# Altium schematic symbol library WR-TBL_Pluggable Connector.SchLib: 879 symbols (part 2 of 15)
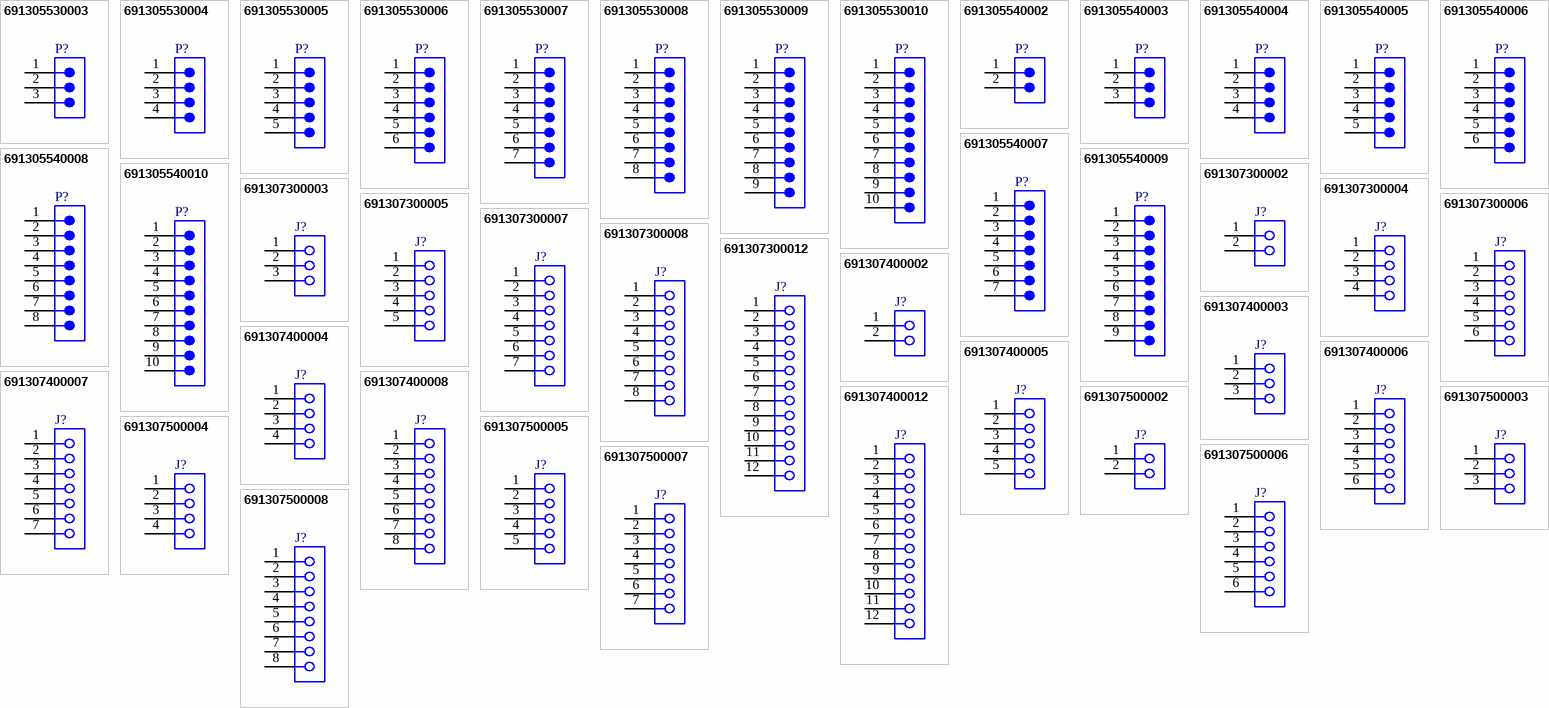
[diagram p22: symbols 691305530003 to 691307500008]

## 691307300012
designator J?  (value not drawn)
WR-TBL Series 3073 Vertical Reversed PCB Header, THT, pitch 3.81mm, 12p; Manufacturer: Wurth Elektronik; Modularity: No; Rated Current: 8A; Working Voltage: 300V (AC); Manufacturer Part Number: 691307300012; Product Series: WR-TBL; ComponentLink1Description: Website Link; ComponentLink1URL: https://www.we-online.com; ComponentLink2Description: Datasheet Link; ComponentLink2URL: https://www.we-online.com/components/products/datasheet/691307300012; Mount: Through Hole; Operating Temperature Min: -40degC; Operating Temperature Max: 115degC; Packaging: Box; Application: Pluggable; Number of Pins: 12; Number of Rows: 1; Orientation: Vertical; Lead Pitch: 3.81mm
footprint 691307300012
pins: 1, 2, 3, 4, 5, 6, 7, 8, 9, 10, 11, 12

## 691307400002
designator J?  (value not drawn)
WR-TBL Series 3074 Reversed Gender Vertical PCB Header, THT, pitch 7.62mm, 02p; Manufacturer: Wurth Elektronik; Modularity: No; Rated Current: 20A; Working Voltage: 300V (AC); Manufacturer Part Number: 691307400002; Product Series: WR-TBL; ComponentLink1Description: Website Link; ComponentLink1URL: https://www.we-online.com; ComponentLink2Description: Datasheet Link; ComponentLink2URL: https://www.we-online.com/components/products/datasheet/691307400002; Mount: Through Hole; Operating Temperature Min: -40degC; Operating Temperature Max: 105degC; Packaging: Box; Application: Pluggable; Number of Pins: 2; Number of Rows: 1; Orientation: Vertical; Lead Pitch: 7.62mm
footprint 691307400002
pins: 1, 2

## 691307400003
designator J?  (value not drawn)
WR-TBL Series 3074 Reversed Gender Vertical PCB Header, THT, pitch 7.62mm, 03p; Manufacturer: Wurth Elektronik; Modularity: No; Rated Current: 20A; Working Voltage: 300V (AC); Manufacturer Part Number: 691307400003; Product Series: WR-TBL; ComponentLink1Description: Website Link; ComponentLink1URL: https://www.we-online.com; ComponentLink2Description: Datasheet Link; ComponentLink2URL: https://www.we-online.com/components/products/datasheet/691307400003; Mount: Through Hole; Operating Temperature Min: -40degC; Operating Temperature Max: 105degC; Packaging: Box; Application: Pluggable; Number of Pins: 3; Number of Rows: 1; Orientation: Vertical; Lead Pitch: 7.62mm
footprint 691307400003
pins: 1, 2, 3

## 691307400004
designator J?  (value not drawn)
WR-TBL Series 3074 Reversed Gender Vertical PCB Header, THT, pitch 7.62mm, 04p; Manufacturer: Wurth Elektronik; Modularity: No; Rated Current: 20A; Working Voltage: 300V (AC); Manufacturer Part Number: 691307400004; Product Series: WR-TBL; ComponentLink1Description: Website Link; ComponentLink1URL: https://www.we-online.com; ComponentLink2Description: Datasheet Link; ComponentLink2URL: https://www.we-online.com/components/products/datasheet/691307400004; Mount: Through Hole; Operating Temperature Min: -40degC; Operating Temperature Max: 105degC; Packaging: Box; Application: Pluggable; Number of Pins: 4; Number of Rows: 1; Orientation: Vertical; Lead Pitch: 7.62mm
footprint 691307400004
pins: 1, 2, 3, 4

## 691307400005
designator J?  (value not drawn)
WR-TBL Series 3074 Reversed Gender Vertical PCB Header, THT, pitch 7.62mm, 05p; Manufacturer: Wurth Elektronik; Modularity: No; Rated Current: 20A; Working Voltage: 300V (AC); Manufacturer Part Number: 691307400005; Product Series: WR-TBL; ComponentLink1Description: Website Link; ComponentLink1URL: https://www.we-online.com; ComponentLink2Description: Datasheet Link; ComponentLink2URL: https://www.we-online.com/components/products/datasheet/691307400005; Mount: Through Hole; Operating Temperature Min: -40degC; Operating Temperature Max: 105degC; Packaging: Box; Application: Pluggable; Number of Pins: 5; Number of Rows: 1; Orientation: Vertical; Lead Pitch: 7.62mm
footprint 691307400005
pins: 1, 2, 3, 4, 5

## 691307400006
designator J?  (value not drawn)
WR-TBL Series 3074 Reversed Gender Vertical PCB Header, THT, pitch 7.62mm, 06p; Manufacturer: Wurth Elektronik; Modularity: No; Rated Current: 20A; Working Voltage: 300V (AC); Manufacturer Part Number: 691307400006; Product Series: WR-TBL; ComponentLink1Description: Website Link; ComponentLink1URL: https://www.we-online.com; ComponentLink2Description: Datasheet Link; ComponentLink2URL: https://www.we-online.com/components/products/datasheet/691307400006; Mount: Through Hole; Operating Temperature Min: -40degC; Operating Temperature Max: 105degC; Packaging: Box; Application: Pluggable; Number of Pins: 6; Number of Rows: 1; Orientation: Vertical; Lead Pitch: 7.62mm
footprint 691307400006
pins: 1, 2, 3, 4, 5, 6

## 691307400007
designator J?  (value not drawn)
WR-TBL Series 3074 Reversed Gender Vertical PCB Header, THT, pitch 7.62mm, 07p; Manufacturer: Wurth Elektronik; Modularity: No; Rated Current: 20A; Working Voltage: 300V (AC); Manufacturer Part Number: 691307400007; Product Series: WR-TBL; ComponentLink1Description: Website Link; ComponentLink1URL: https://www.we-online.com; ComponentLink2Description: Datasheet Link; ComponentLink2URL: https://www.we-online.com/components/products/datasheet/691307400007; Mount: Through Hole; Operating Temperature Min: -40degC; Operating Temperature Max: 105degC; Packaging: Box; Application: Pluggable; Number of Pins: 7; Number of Rows: 1; Orientation: Vertical; Lead Pitch: 7.62mm
footprint 691307400007
pins: 1, 2, 3, 4, 5, 6, 7

## 691307400008
designator J?  (value not drawn)
WR-TBL Series 3074 Reversed Gender Vertical PCB Header, THT, pitch 7.62mm, 08p; Manufacturer: Wurth Elektronik; Modularity: No; Rated Current: 20A; Working Voltage: 300V (AC); Manufacturer Part Number: 691307400008; Product Series: WR-TBL; ComponentLink1Description: Website Link; ComponentLink1URL: https://www.we-online.com; ComponentLink2Description: Datasheet Link; ComponentLink2URL: https://www.we-online.com/components/products/datasheet/691307400008; Mount: Through Hole; Operating Temperature Min: -40degC; Operating Temperature Max: 105degC; Packaging: Box; Application: Pluggable; Number of Pins: 8; Number of Rows: 1; Orientation: Vertical; Lead Pitch: 7.62mm
footprint 691307400008
pins: 1, 2, 3, 4, 5, 6, 7, 8

## 691307400012
designator J?  (value not drawn)
WR-TBL Series 3074 Reversed Gender Vertical PCB Header, THT, pitch 7.62mm, 12p; Manufacturer: Wurth Elektronik; Modularity: No; Rated Current: 20A; Working Voltage: 300V (AC); Manufacturer Part Number: 691307400012; Product Series: WR-TBL; ComponentLink1Description: Website Link; ComponentLink1URL: https://www.we-online.com; ComponentLink2Description: Datasheet Link; ComponentLink2URL: https://www.we-online.com/components/products/datasheet/691307400012; Mount: Through Hole; Operating Temperature Min: -40degC; Operating Temperature Max: 105degC; Packaging: Box; Application: Pluggable; Number of Pins: 12; Number of Rows: 1; Orientation: Vertical; Lead Pitch: 7.62mm
footprint 691307400012
pins: 1, 2, 3, 4, 5, 6, 7, 8, 9, 10, 11, 12

## 691307500002
designator J?  (value not drawn)
WR-TBL Series 3075 Reversed Gender Vertical PCB Header, THT, pitch 5.08mm, 02p; Manufacturer: Wurth Elektronik; Modularity: No; Rated Current: 20A; Working Voltage: 300V (AC); Manufacturer Part Number: 691307500002; Product Series: WR-TBL; ComponentLink1Description: Website Link; ComponentLink1URL: https://www.we-online.com; ComponentLink2Description: Datasheet Link; ComponentLink2URL: https://www.we-online.com/components/products/datasheet/691307500002; Mount: Through Hole; Operating Temperature Min: -40degC; Operating Temperature Max: 105degC; Packaging: Box; Application: Pluggable; Number of Pins: 2; Number of Rows: 1; Orientation: Vertical; Lead Pitch: 5.08mm
footprint 691307500002
pins: 1, 2

## 691307500003
designator J?  (value not drawn)
WR-TBL Series 3075 Reversed Gender Vertical PCB Header, THT, pitch 5.08mm, 03p; Manufacturer: Wurth Elektronik; Modularity: No; Rated Current: 20A; Working Voltage: 300V (AC); Manufacturer Part Number: 691307500003; Product Series: WR-TBL; ComponentLink1Description: Website Link; ComponentLink1URL: https://www.we-online.com; ComponentLink2Description: Datasheet Link; ComponentLink2URL: https://www.we-online.com/components/products/datasheet/691307500003; Mount: Through Hole; Operating Temperature Min: -40degC; Operating Temperature Max: 105degC; Packaging: Box; Application: Pluggable; Number of Pins: 3; Number of Rows: 1; Orientation: Vertical; Lead Pitch: 5.08mm
footprint 691307500003
pins: 1, 2, 3

## 691307500004
designator J?  (value not drawn)
WR-TBL Series 3075 Reversed Gender Vertical PCB Header, THT, pitch 5.08mm, 04p; Manufacturer: Wurth Elektronik; Modularity: No; Rated Current: 20A; Working Voltage: 300V (AC); Manufacturer Part Number: 691307500004; Product Series: WR-TBL; ComponentLink1Description: Website Link; ComponentLink1URL: https://www.we-online.com; ComponentLink2Description: Datasheet Link; ComponentLink2URL: https://www.we-online.com/components/products/datasheet/691307500004; Mount: Through Hole; Operating Temperature Min: -40degC; Operating Temperature Max: 105degC; Packaging: Box; Application: Pluggable; Number of Pins: 4; Number of Rows: 1; Orientation: Vertical; Lead Pitch: 5.08mm
footprint 691307500004
pins: 1, 2, 3, 4

## 691307500005
designator J?  (value not drawn)
WR-TBL Series 3075 Reversed Gender Vertical PCB Header, THT, pitch 5.08mm, 05p; Manufacturer: Wurth Elektronik; Modularity: No; Rated Current: 20A; Working Voltage: 300V (AC); Manufacturer Part Number: 691307500005; Product Series: WR-TBL; ComponentLink1Description: Website Link; ComponentLink1URL: https://www.we-online.com; ComponentLink2Description: Datasheet Link; ComponentLink2URL: https://www.we-online.com/components/products/datasheet/691307500005; Mount: Through Hole; Operating Temperature Min: -40degC; Operating Temperature Max: 105degC; Packaging: Box; Application: Pluggable; Number of Pins: 5; Number of Rows: 1; Orientation: Vertical; Lead Pitch: 5.08mm
footprint 691307500005
pins: 1, 2, 3, 4, 5

## 691307500006
designator J?  (value not drawn)
WR-TBL Series 3075 Reversed Gender Vertical PCB Header, THT, pitch 5.08mm, 06p; Manufacturer: Wurth Elektronik; Modularity: No; Rated Current: 20A; Working Voltage: 300V (AC); Manufacturer Part Number: 691307500006; Product Series: WR-TBL; ComponentLink1Description: Website Link; ComponentLink1URL: https://www.we-online.com; ComponentLink2Description: Datasheet Link; ComponentLink2URL: https://www.we-online.com/components/products/datasheet/691307500006; Mount: Through Hole; Operating Temperature Min: -40degC; Operating Temperature Max: 105degC; Packaging: Box; Application: Pluggable; Number of Pins: 6; Number of Rows: 1; Orientation: Vertical; Lead Pitch: 5.08mm
footprint 691307500006
pins: 1, 2, 3, 4, 5, 6

## 691307500007
designator J?  (value not drawn)
WR-TBL Series 3075 Reversed Gender Vertical PCB Header, THT, pitch 5.08mm, 07p; Manufacturer: Wurth Elektronik; Modularity: No; Rated Current: 20A; Working Voltage: 300V (AC); Manufacturer Part Number: 691307500007; Product Series: WR-TBL; ComponentLink1Description: Website Link; ComponentLink1URL: https://www.we-online.com; ComponentLink2Description: Datasheet Link; ComponentLink2URL: https://www.we-online.com/components/products/datasheet/691307500007; Mount: Through Hole; Operating Temperature Min: -40degC; Operating Temperature Max: 105degC; Packaging: Box; Application: Pluggable; Number of Pins: 7; Number of Rows: 1; Orientation: Vertical; Lead Pitch: 5.08mm
footprint 691307500007
pins: 1, 2, 3, 4, 5, 6, 7

## 691307500008
designator J?  (value not drawn)
WR-TBL Series 3075 Reversed Gender Vertical PCB Header, THT, pitch 5.08mm, 08p; Manufacturer: Wurth Elektronik; Modularity: No; Rated Current: 20A; Working Voltage: 300V (AC); Manufacturer Part Number: 691307500008; Product Series: WR-TBL; ComponentLink1Description: Website Link; ComponentLink1URL: https://www.we-online.com; ComponentLink2Description: Datasheet Link; ComponentLink2URL: https://www.we-online.com/components/products/datasheet/691307500008; Mount: Through Hole; Operating Temperature Min: -40degC; Operating Temperature Max: 105degC; Packaging: Box; Application: Pluggable; Number of Pins: 8; Number of Rows: 1; Orientation: Vertical; Lead Pitch: 5.08mm
footprint 691307500008
pins: 1, 2, 3, 4, 5, 6, 7, 8

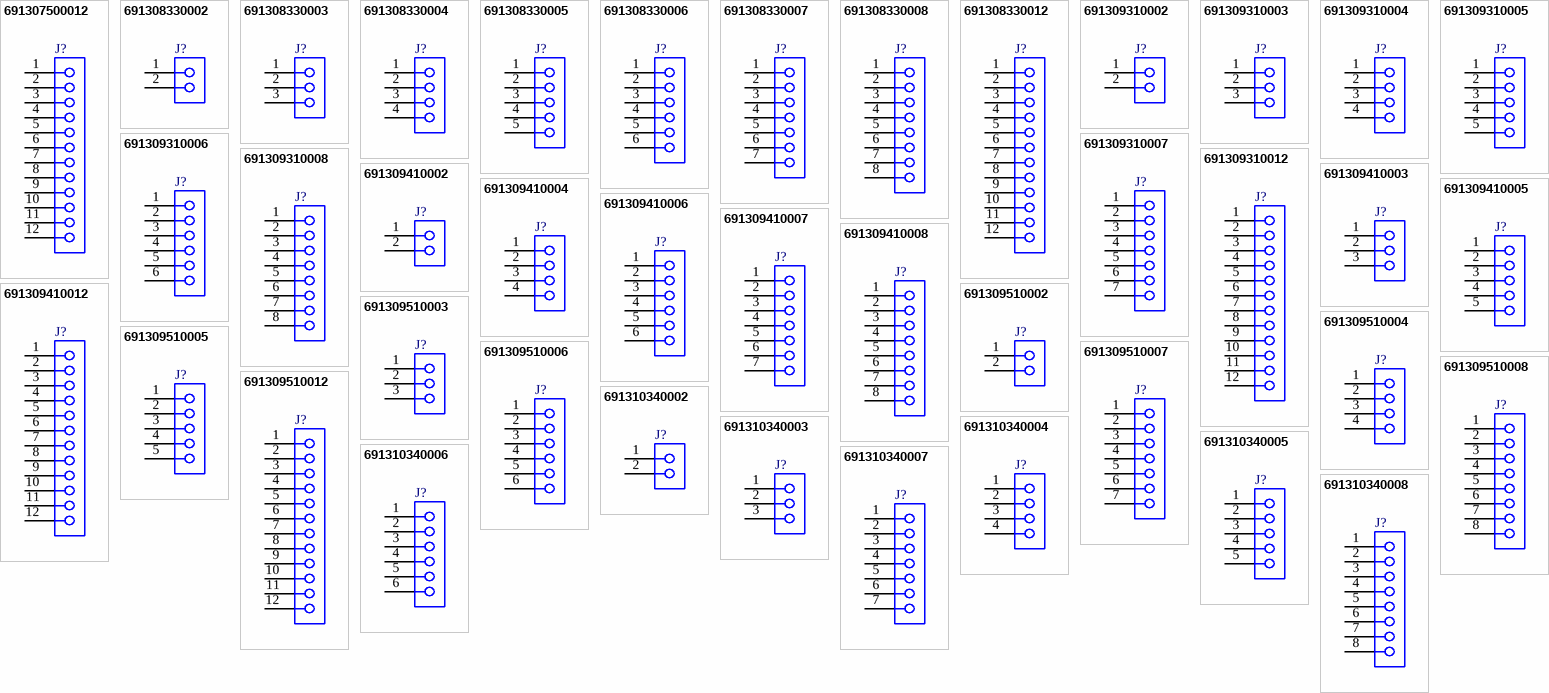
[diagram p2: symbols 691307500012 to 691310340008]

## 691307500012
designator J?  (value not drawn)
WR-TBL Series 3075 Reversed Gender Vertical PCB Header, THT, pitch 5.08mm, 12p; Manufacturer: Wurth Elektronik; Modularity: No; Rated Current: 20A; Working Voltage: 300V (AC); Manufacturer Part Number: 691307500012; Product Series: WR-TBL; ComponentLink1Description: Website Link; ComponentLink1URL: https://www.we-online.com; ComponentLink2Description: Datasheet Link; ComponentLink2URL: https://www.we-online.com/components/products/datasheet/691307500012; Mount: Through Hole; Operating Temperature Min: -40degC; Operating Temperature Max: 105degC; Packaging: Box; Application: Pluggable; Number of Pins: 12; Number of Rows: 1; Orientation: Vertical; Lead Pitch: 5.08mm
footprint 691307500012
pins: 1, 2, 3, 4, 5, 6, 7, 8, 9, 10, 11, 12

## 691308330002
designator J?  (value not drawn)
WR-TBL Series 3083 Vertical Reserved PCB Header with Flanges, THT, pitch 3.81mm, 02p; Manufacturer: Wurth Elektronik; Modularity: No; Rated Current: 8A; Working Voltage: 300V (AC); Manufacturer Part Number: 691308330002; Product Series: WR-TBL; ComponentLink1Description: Website Link; ComponentLink1URL: https://www.we-online.com; ComponentLink2Description: Datasheet Link; ComponentLink2URL: https://www.we-online.com/components/products/datasheet/691308330002; Mount: Through Hole; Operating Temperature Min: -40degC; Operating Temperature Max: 115degC; Packaging: Box; Application: Pluggable; Number of Pins: 2; Number of Rows: 1; Orientation: Vertical; Lead Pitch: 3.81mm
footprint 691308330002
pins: 1, 2

## 691308330003
designator J?  (value not drawn)
WR-TBL Series 3083 Vertical Reserved PCB Header with Flanges, THT, pitch 3.81mm, 03p; Manufacturer: Wurth Elektronik; Modularity: No; Rated Current: 8A; Working Voltage: 300V (AC); Manufacturer Part Number: 691308330003; Product Series: WR-TBL; ComponentLink1Description: Website Link; ComponentLink1URL: https://www.we-online.com; ComponentLink2Description: Datasheet Link; ComponentLink2URL: https://www.we-online.com/components/products/datasheet/691308330003; Mount: Through Hole; Operating Temperature Min: -40degC; Operating Temperature Max: 115degC; Packaging: Box; Application: Pluggable; Number of Pins: 3; Number of Rows: 1; Orientation: Vertical; Lead Pitch: 3.81mm
footprint 691308330003
pins: 1, 2, 3

## 691308330004
designator J?  (value not drawn)
WR-TBL Series 3083 Vertical Reserved PCB Header with Flanges, THT, pitch 3.81mm, 04p; Manufacturer: Wurth Elektronik; Modularity: No; Rated Current: 8A; Working Voltage: 300V (AC); Manufacturer Part Number: 691308330004; Product Series: WR-TBL; ComponentLink1Description: Website Link; ComponentLink1URL: https://www.we-online.com; ComponentLink2Description: Datasheet Link; ComponentLink2URL: https://www.we-online.com/components/products/datasheet/691308330004; Mount: Through Hole; Operating Temperature Min: -40degC; Operating Temperature Max: 115degC; Packaging: Box; Application: Pluggable; Number of Pins: 4; Number of Rows: 1; Orientation: Vertical; Lead Pitch: 3.81mm
footprint 691308330004
pins: 1, 2, 3, 4

## 691308330005
designator J?  (value not drawn)
WR-TBL Series 3083 Vertical Reserved PCB Header with Flanges, THT, pitch 3.81mm, 05p; Manufacturer: Wurth Elektronik; Modularity: No; Rated Current: 8A; Working Voltage: 300V (AC); Manufacturer Part Number: 691308330005; Product Series: WR-TBL; ComponentLink1Description: Website Link; ComponentLink1URL: https://www.we-online.com; ComponentLink2Description: Datasheet Link; ComponentLink2URL: https://www.we-online.com/components/products/datasheet/691308330005; Mount: Through Hole; Operating Temperature Min: -40degC; Operating Temperature Max: 115degC; Packaging: Box; Application: Pluggable; Number of Pins: 5; Number of Rows: 1; Orientation: Vertical; Lead Pitch: 3.81mm
footprint 691308330005
pins: 1, 2, 3, 4, 5

## 691308330006
designator J?  (value not drawn)
WR-TBL Series 3083 Vertical Reserved PCB Header with Flanges, THT, pitch 3.81mm, 06p; Manufacturer: Wurth Elektronik; Modularity: No; Rated Current: 8A; Working Voltage: 300V (AC); Manufacturer Part Number: 691308330006; Product Series: WR-TBL; ComponentLink1Description: Website Link; ComponentLink1URL: https://www.we-online.com; ComponentLink2Description: Datasheet Link; ComponentLink2URL: https://www.we-online.com/components/products/datasheet/691308330006; Mount: Through Hole; Operating Temperature Min: -40degC; Operating Temperature Max: 115degC; Packaging: Box; Application: Pluggable; Number of Pins: 6; Number of Rows: 1; Orientation: Vertical; Lead Pitch: 3.81mm
footprint 691308330006
pins: 1, 2, 3, 4, 5, 6

## 691308330007
designator J?  (value not drawn)
WR-TBL Series 3083 Vertical Reserved PCB Header with Flanges, THT, pitch 3.81mm, 07p; Manufacturer: Wurth Elektronik; Modularity: No; Rated Current: 8A; Working Voltage: 300V (AC); Manufacturer Part Number: 691308330007; Product Series: WR-TBL; ComponentLink1Description: Website Link; ComponentLink1URL: https://www.we-online.com; ComponentLink2Description: Datasheet Link; ComponentLink2URL: https://www.we-online.com/components/products/datasheet/691308330007; Mount: Through Hole; Operating Temperature Min: -40degC; Operating Temperature Max: 115degC; Packaging: Box; Application: Pluggable; Number of Pins: 7; Number of Rows: 1; Orientation: Vertical; Lead Pitch: 3.81mm
footprint 691308330007
pins: 1, 2, 3, 4, 5, 6, 7

## 691308330008
designator J?  (value not drawn)
WR-TBL Series 3083 Vertical Reserved PCB Header with Flanges, THT, pitch 3.81mm, 08p; Manufacturer: Wurth Elektronik; Modularity: No; Rated Current: 8A; Working Voltage: 300V (AC); Manufacturer Part Number: 691308330008; Product Series: WR-TBL; ComponentLink1Description: Website Link; ComponentLink1URL: https://www.we-online.com; ComponentLink2Description: Datasheet Link; ComponentLink2URL: https://www.we-online.com/components/products/datasheet/691308330008; Mount: Through Hole; Operating Temperature Min: -40degC; Operating Temperature Max: 115degC; Packaging: Box; Application: Pluggable; Number of Pins: 8; Number of Rows: 1; Orientation: Vertical; Lead Pitch: 3.81mm
footprint 691308330008
pins: 1, 2, 3, 4, 5, 6, 7, 8

## 691308330012
designator J?  (value not drawn)
WR-TBL Series 3083 Vertical Reserved PCB Header with Flanges, THT, pitch 3.81mm, 12p; Manufacturer: Wurth Elektronik; Modularity: No; Rated Current: 8A; Working Voltage: 300V (AC); Manufacturer Part Number: 691308330012; Product Series: WR-TBL; ComponentLink1Description: Website Link; ComponentLink1URL: https://www.we-online.com; ComponentLink2Description: Datasheet Link; ComponentLink2URL: https://www.we-online.com/components/products/datasheet/691308330012; Mount: Through Hole; Operating Temperature Min: -40degC; Operating Temperature Max: 115degC; Packaging: Box; Application: Pluggable; Number of Pins: 12; Number of Rows: 1; Orientation: Vertical; Lead Pitch: 3.81mm
footprint 691308330012
pins: 1, 2, 3, 4, 5, 6, 7, 8, 9, 10, 11, 12

## 691309310002
designator J?  (value not drawn)
WR-TBL Series 3093 Horizontal Reserved PCB Header with Flanges, THT, pitch 3.81mm, 02p; Manufacturer: Wurth Elektronik; Modularity: No; Rated Current: 8A; Working Voltage: 300V (AC); Manufacturer Part Number: 691309310002; Product Series: WR-TBL; ComponentLink1Description: Website Link; ComponentLink1URL: https://www.we-online.com; ComponentLink2Description: Datasheet Link; ComponentLink2URL: https://www.we-online.com/components/products/datasheet/691309310002; Mount: Through Hole; Operating Temperature Min: -40degC; Operating Temperature Max: 115degC; Packaging: Box; Application: Pluggable; Number of Pins: 2; Number of Rows: 1; Orientation: Horizontal; Lead Pitch: 3.81mm
footprint 691309310002
pins: 1, 2

## 691309310003
designator J?  (value not drawn)
WR-TBL Series 3093 Horizontal Reserved PCB Header with Flanges, THT, pitch 3.81mm, 03p; Manufacturer: Wurth Elektronik; Modularity: No; Rated Current: 8A; Working Voltage: 300V (AC); Manufacturer Part Number: 691309310003; Product Series: WR-TBL; ComponentLink1Description: Website Link; ComponentLink1URL: https://www.we-online.com; ComponentLink2Description: Datasheet Link; ComponentLink2URL: https://www.we-online.com/components/products/datasheet/691309310003; Mount: Through Hole; Operating Temperature Min: -40degC; Operating Temperature Max: 115degC; Packaging: Box; Application: Pluggable; Number of Pins: 3; Number of Rows: 1; Orientation: Horizontal; Lead Pitch: 3.81mm
footprint 691309310003
pins: 1, 2, 3

## 691309310004
designator J?  (value not drawn)
WR-TBL Series 3093 Horizontal Reserved PCB Header with Flanges, THT, pitch 3.81mm, 04p; Manufacturer: Wurth Elektronik; Modularity: No; Rated Current: 8A; Working Voltage: 300V (AC); Manufacturer Part Number: 691309310004; Product Series: WR-TBL; ComponentLink1Description: Website Link; ComponentLink1URL: https://www.we-online.com; ComponentLink2Description: Datasheet Link; ComponentLink2URL: https://www.we-online.com/components/products/datasheet/691309310004; Mount: Through Hole; Operating Temperature Min: -40degC; Operating Temperature Max: 115degC; Packaging: Box; Application: Pluggable; Number of Pins: 4; Number of Rows: 1; Orientation: Horizontal; Lead Pitch: 3.81mm
footprint 691309310004
pins: 1, 2, 3, 4

## 691309310005
designator J?  (value not drawn)
WR-TBL Series 3093 Horizontal Reserved PCB Header with Flanges, THT, pitch 3.81mm, 05p; Manufacturer: Wurth Elektronik; Modularity: No; Rated Current: 8A; Working Voltage: 300V (AC); Manufacturer Part Number: 691309310005; Product Series: WR-TBL; ComponentLink1Description: Website Link; ComponentLink1URL: https://www.we-online.com; ComponentLink2Description: Datasheet Link; ComponentLink2URL: https://www.we-online.com/components/products/datasheet/691309310005; Mount: Through Hole; Operating Temperature Min: -40degC; Operating Temperature Max: 115degC; Packaging: Box; Application: Pluggable; Number of Pins: 5; Number of Rows: 1; Orientation: Horizontal; Lead Pitch: 3.81mm
footprint 691309310005
pins: 1, 2, 3, 4, 5

## 691309310006
designator J?  (value not drawn)
WR-TBL Series 3093 Horizontal Reserved PCB Header with Flanges, THT, pitch 3.81mm, 06p; Manufacturer: Wurth Elektronik; Modularity: No; Rated Current: 8A; Working Voltage: 300V (AC); Manufacturer Part Number: 691309310006; Product Series: WR-TBL; ComponentLink1Description: Website Link; ComponentLink1URL: https://www.we-online.com; ComponentLink2Description: Datasheet Link; ComponentLink2URL: https://www.we-online.com/components/products/datasheet/691309310006; Mount: Through Hole; Operating Temperature Min: -40degC; Operating Temperature Max: 115degC; Packaging: Box; Application: Pluggable; Number of Pins: 6; Number of Rows: 1; Orientation: Horizontal; Lead Pitch: 3.81mm
footprint 691309310006
pins: 1, 2, 3, 4, 5, 6

## 691309310007
designator J?  (value not drawn)
WR-TBL Series 3093 Horizontal Reserved PCB Header with Flanges, THT, pitch 3.81mm, 07p; Manufacturer: Wurth Elektronik; Modularity: No; Rated Current: 8A; Working Voltage: 300V (AC); Manufacturer Part Number: 691309310007; Product Series: WR-TBL; ComponentLink1Description: Website Link; ComponentLink1URL: https://www.we-online.com; ComponentLink2Description: Datasheet Link; ComponentLink2URL: https://www.we-online.com/components/products/datasheet/691309310007; Mount: Through Hole; Operating Temperature Min: -40degC; Operating Temperature Max: 115degC; Packaging: Box; Application: Pluggable; Number of Pins: 7; Number of Rows: 1; Orientation: Horizontal; Lead Pitch: 3.81mm
footprint 691309310007
pins: 1, 2, 3, 4, 5, 6, 7

## 691309310008
designator J?  (value not drawn)
WR-TBL Series 3093 Horizontal Reserved PCB Header with Flanges, THT, pitch 3.81mm, 08p; Manufacturer: Wurth Elektronik; Modularity: No; Rated Current: 8A; Working Voltage: 300V (AC); Manufacturer Part Number: 691309310008; Product Series: WR-TBL; ComponentLink1Description: Website Link; ComponentLink1URL: https://www.we-online.com; ComponentLink2Description: Datasheet Link; ComponentLink2URL: https://www.we-online.com/components/products/datasheet/691309310008; Mount: Through Hole; Operating Temperature Min: -40degC; Operating Temperature Max: 115degC; Packaging: Box; Application: Pluggable; Number of Pins: 8; Number of Rows: 1; Orientation: Horizontal; Lead Pitch: 3.81mm
footprint 691309310008
pins: 1, 2, 3, 4, 5, 6, 7, 8

## 691309310012
designator J?  (value not drawn)
WR-TBL Series 3093 Horizontal Reserved PCB Header with Flanges, THT, pitch 3.81mm, 12p; Manufacturer: Wurth Elektronik; Modularity: No; Rated Current: 8A; Working Voltage: 300V (AC); Manufacturer Part Number: 691309310012; Product Series: WR-TBL; ComponentLink1Description: Website Link; ComponentLink1URL: https://www.we-online.com; ComponentLink2Description: Datasheet Link; ComponentLink2URL: https://www.we-online.com/components/products/datasheet/691309310012; Mount: Through Hole; Operating Temperature Min: -40degC; Operating Temperature Max: 115degC; Packaging: Box; Application: Pluggable; Number of Pins: 12; Number of Rows: 1; Orientation: Horizontal; Lead Pitch: 3.81mm
footprint 691309310012
pins: 1, 2, 3, 4, 5, 6, 7, 8, 9, 10, 11, 12

## 691309410002
designator J?  (value not drawn)
WR-TBL Series 3094 Reversed Gender Horizontal PCB Header, THT, pitch 7.62mm, 02p; Manufacturer: Wurth Elektronik; Modularity: No; Rated Current: 20A; Working Voltage: 300V (AC); Manufacturer Part Number: 691309410002; Product Series: WR-TBL; ComponentLink1Description: Website Link; ComponentLink1URL: https://www.we-online.com; ComponentLink2Description: Datasheet Link; ComponentLink2URL: https://www.we-online.com/components/products/datasheet/691309410002; Mount: Through Hole; Operating Temperature Min: -40degC; Operating Temperature Max: 105degC; Packaging: Box; Application: Pluggable; Number of Pins: 2; Number of Rows: 1; Orientation: Horizontal; Lead Pitch: 7.62mm
footprint 691309410002
pins: 1, 2

## 691309410003
designator J?  (value not drawn)
WR-TBL Series 3094 Reversed Gender Horizontal PCB Header, THT, pitch 7.62mm, 03p; Manufacturer: Wurth Elektronik; Modularity: No; Rated Current: 20A; Working Voltage: 300V (AC); Manufacturer Part Number: 691309410003; Product Series: WR-TBL; ComponentLink1Description: Website Link; ComponentLink1URL: https://www.we-online.com; ComponentLink2Description: Datasheet Link; ComponentLink2URL: https://www.we-online.com/components/products/datasheet/691309410003; Mount: Through Hole; Operating Temperature Min: -40degC; Operating Temperature Max: 105degC; Packaging: Box; Application: Pluggable; Number of Pins: 3; Number of Rows: 1; Orientation: Horizontal; Lead Pitch: 7.62mm
footprint 691309410003
pins: 1, 2, 3

## 691309410004
designator J?  (value not drawn)
WR-TBL Series 3094 Reversed Gender Horizontal PCB Header, THT, pitch 7.62mm, 04p; Manufacturer: Wurth Elektronik; Modularity: No; Rated Current: 20A; Working Voltage: 300V (AC); Manufacturer Part Number: 691309410004; Product Series: WR-TBL; ComponentLink1Description: Website Link; ComponentLink1URL: https://www.we-online.com; ComponentLink2Description: Datasheet Link; ComponentLink2URL: https://www.we-online.com/components/products/datasheet/691309410004; Mount: Through Hole; Operating Temperature Min: -40degC; Operating Temperature Max: 105degC; Packaging: Box; Application: Pluggable; Number of Pins: 4; Number of Rows: 1; Orientation: Horizontal; Lead Pitch: 7.62mm
footprint 691309410004
pins: 1, 2, 3, 4

## 691309410005
designator J?  (value not drawn)
WR-TBL Series 3094 Reversed Gender Horizontal PCB Header, THT, pitch 7.62mm, 05p; Manufacturer: Wurth Elektronik; Modularity: No; Rated Current: 20A; Working Voltage: 300V (AC); Manufacturer Part Number: 691309410005; Product Series: WR-TBL; ComponentLink1Description: Website Link; ComponentLink1URL: https://www.we-online.com; ComponentLink2Description: Datasheet Link; ComponentLink2URL: https://www.we-online.com/components/products/datasheet/691309410005; Mount: Through Hole; Operating Temperature Min: -40degC; Operating Temperature Max: 105degC; Packaging: Box; Application: Pluggable; Number of Pins: 5; Number of Rows: 1; Orientation: Horizontal; Lead Pitch: 7.62mm
footprint 691309410005
pins: 1, 2, 3, 4, 5

## 691309410006
designator J?  (value not drawn)
WR-TBL Series 3094 Reversed Gender Horizontal PCB Header, THT, pitch 7.62mm, 06p; Manufacturer: Wurth Elektronik; Modularity: No; Rated Current: 20A; Working Voltage: 300V (AC); Manufacturer Part Number: 691309410006; Product Series: WR-TBL; ComponentLink1Description: Website Link; ComponentLink1URL: https://www.we-online.com; ComponentLink2Description: Datasheet Link; ComponentLink2URL: https://www.we-online.com/components/products/datasheet/691309410006; Mount: Through Hole; Operating Temperature Min: -40degC; Operating Temperature Max: 105degC; Packaging: Box; Application: Pluggable; Number of Pins: 6; Number of Rows: 1; Orientation: Horizontal; Lead Pitch: 7.62mm
footprint 691309410006
pins: 1, 2, 3, 4, 5, 6

## 691309410007
designator J?  (value not drawn)
WR-TBL Series 3094 Reversed Gender Horizontal PCB Header, THT, pitch 7.62mm, 07p; Manufacturer: Wurth Elektronik; Modularity: No; Rated Current: 20A; Working Voltage: 300V (AC); Manufacturer Part Number: 691309410007; Product Series: WR-TBL; ComponentLink1Description: Website Link; ComponentLink1URL: https://www.we-online.com; ComponentLink2Description: Datasheet Link; ComponentLink2URL: https://www.we-online.com/components/products/datasheet/691309410007; Mount: Through Hole; Operating Temperature Min: -40degC; Operating Temperature Max: 105degC; Packaging: Box; Application: Pluggable; Number of Pins: 7; Number of Rows: 1; Orientation: Horizontal; Lead Pitch: 7.62mm
footprint 691309410007
pins: 1, 2, 3, 4, 5, 6, 7

## 691309410008
designator J?  (value not drawn)
WR-TBL Series 3094 Reversed Gender Horizontal PCB Header, THT, pitch 7.62mm, 08p; Manufacturer: Wurth Elektronik; Modularity: No; Rated Current: 20A; Working Voltage: 300V (AC); Manufacturer Part Number: 691309410008; Product Series: WR-TBL; ComponentLink1Description: Website Link; ComponentLink1URL: https://www.we-online.com; ComponentLink2Description: Datasheet Link; ComponentLink2URL: https://www.we-online.com/components/products/datasheet/691309410008; Mount: Through Hole; Operating Temperature Min: -40degC; Operating Temperature Max: 105degC; Packaging: Box; Application: Pluggable; Number of Pins: 8; Number of Rows: 1; Orientation: Horizontal; Lead Pitch: 7.62mm
footprint 691309410008
pins: 1, 2, 3, 4, 5, 6, 7, 8

## 691309410012
designator J?  (value not drawn)
WR-TBL Series 3094 Reversed Gender Horizontal PCB Header, THT, pitch 7.62mm, 12p; Manufacturer: Wurth Elektronik; Modularity: No; Rated Current: 20A; Working Voltage: 300V (AC); Manufacturer Part Number: 691309410012; Product Series: WR-TBL; ComponentLink1Description: Website Link; ComponentLink1URL: https://www.we-online.com; ComponentLink2Description: Datasheet Link; ComponentLink2URL: https://www.we-online.com/components/products/datasheet/691309410012; Mount: Through Hole; Operating Temperature Min: -40degC; Operating Temperature Max: 105degC; Packaging: Box; Application: Pluggable; Number of Pins: 12; Number of Rows: 1; Orientation: Horizontal; Lead Pitch: 7.62mm
footprint 691309410012
pins: 1, 2, 3, 4, 5, 6, 7, 8, 9, 10, 11, 12

## 691309510002
designator J?  (value not drawn)
WR-TBL Series 3095 Reversed Gender Horizontal PCB Header, THT, pitch 5.08mm, 02p; Manufacturer: Wurth Elektronik; Modularity: No; Rated Current: 20A; Working Voltage: 300V (AC); Manufacturer Part Number: 691309510002; Product Series: WR-TBL; ComponentLink1Description: Website Link; ComponentLink1URL: https://www.we-online.com; ComponentLink2Description: Datasheet Link; ComponentLink2URL: https://www.we-online.com/components/products/datasheet/691309510002; Mount: Through Hole; Operating Temperature Min: -40degC; Operating Temperature Max: 105degC; Packaging: Box; Application: Pluggable; Number of Pins: 2; Number of Rows: 1; Orientation: Horizontal; Lead Pitch: 5.08mm
footprint 691309510002
pins: 1, 2

## 691309510003
designator J?  (value not drawn)
WR-TBL Series 3095 Reversed Gender Horizontal PCB Header, THT, pitch 5.08mm, 03p; Manufacturer: Wurth Elektronik; Modularity: No; Rated Current: 20A; Working Voltage: 300V (AC); Manufacturer Part Number: 691309510003; Product Series: WR-TBL; ComponentLink1Description: Website Link; ComponentLink1URL: https://www.we-online.com; ComponentLink2Description: Datasheet Link; ComponentLink2URL: https://www.we-online.com/components/products/datasheet/691309510003; Mount: Through Hole; Operating Temperature Min: -40degC; Operating Temperature Max: 105degC; Packaging: Box; Application: Pluggable; Number of Pins: 3; Number of Rows: 1; Orientation: Horizontal; Lead Pitch: 5.08mm
footprint 691309510003
pins: 1, 2, 3

## 691309510004
designator J?  (value not drawn)
WR-TBL Series 3095 Reversed Gender Horizontal PCB Header, THT, pitch 5.08mm, 04p; Manufacturer: Wurth Elektronik; Modularity: No; Rated Current: 20A; Working Voltage: 300V (AC); Manufacturer Part Number: 691309510004; Product Series: WR-TBL; ComponentLink1Description: Website Link; ComponentLink1URL: https://www.we-online.com; ComponentLink2Description: Datasheet Link; ComponentLink2URL: https://www.we-online.com/components/products/datasheet/691309510004; Mount: Through Hole; Operating Temperature Min: -40degC; Operating Temperature Max: 105degC; Packaging: Box; Application: Pluggable; Number of Pins: 4; Number of Rows: 1; Orientation: Horizontal; Lead Pitch: 5.08mm
footprint 691309510004
pins: 1, 2, 3, 4

## 691309510005
designator J?  (value not drawn)
WR-TBL Series 3095 Reversed Gender Horizontal PCB Header, THT, pitch 5.08mm, 05p; Manufacturer: Wurth Elektronik; Modularity: No; Rated Current: 20A; Working Voltage: 300V (AC); Manufacturer Part Number: 691309510005; Product Series: WR-TBL; ComponentLink1Description: Website Link; ComponentLink1URL: https://www.we-online.com; ComponentLink2Description: Datasheet Link; ComponentLink2URL: https://www.we-online.com/components/products/datasheet/691309510005; Mount: Through Hole; Operating Temperature Min: -40degC; Operating Temperature Max: 105degC; Packaging: Box; Application: Pluggable; Number of Pins: 5; Number of Rows: 1; Orientation: Horizontal; Lead Pitch: 5.08mm
footprint 691309510005
pins: 1, 2, 3, 4, 5

## 691309510006
designator J?  (value not drawn)
WR-TBL Series 3095 Reversed Gender Horizontal PCB Header, THT, pitch 5.08mm, 06p; Manufacturer: Wurth Elektronik; Modularity: No; Rated Current: 20A; Working Voltage: 300V (AC); Manufacturer Part Number: 691309510006; Product Series: WR-TBL; ComponentLink1Description: Website Link; ComponentLink1URL: https://www.we-online.com; ComponentLink2Description: Datasheet Link; ComponentLink2URL: https://www.we-online.com/components/products/datasheet/691309510006; Mount: Through Hole; Operating Temperature Min: -40degC; Operating Temperature Max: 105degC; Packaging: Box; Application: Pluggable; Number of Pins: 6; Number of Rows: 1; Orientation: Horizontal; Lead Pitch: 5.08mm
footprint 691309510006
pins: 1, 2, 3, 4, 5, 6

## 691309510007
designator J?  (value not drawn)
WR-TBL Series 3095 Reversed Gender Horizontal PCB Header, THT, pitch 5.08mm, 07p; Manufacturer: Wurth Elektronik; Modularity: No; Rated Current: 20A; Working Voltage: 300V (AC); Manufacturer Part Number: 691309510007; Product Series: WR-TBL; ComponentLink1Description: Website Link; ComponentLink1URL: https://www.we-online.com; ComponentLink2Description: Datasheet Link; ComponentLink2URL: https://www.we-online.com/components/products/datasheet/691309510007; Mount: Through Hole; Operating Temperature Min: -40degC; Operating Temperature Max: 105degC; Packaging: Box; Application: Pluggable; Number of Pins: 7; Number of Rows: 1; Orientation: Horizontal; Lead Pitch: 5.08mm
footprint 691309510007
pins: 1, 2, 3, 4, 5, 6, 7

## 691309510008
designator J?  (value not drawn)
WR-TBL Series 3095 Reversed Gender Horizontal PCB Header, THT, pitch 5.08mm, 08p; Manufacturer: Wurth Elektronik; Modularity: No; Rated Current: 20A; Working Voltage: 300V (AC); Manufacturer Part Number: 691309510008; Product Series: WR-TBL; ComponentLink1Description: Website Link; ComponentLink1URL: https://www.we-online.com; ComponentLink2Description: Datasheet Link; ComponentLink2URL: https://www.we-online.com/components/products/datasheet/691309510008; Mount: Through Hole; Operating Temperature Min: -40degC; Operating Temperature Max: 105degC; Packaging: Box; Application: Pluggable; Number of Pins: 8; Number of Rows: 1; Orientation: Horizontal; Lead Pitch: 5.08mm
footprint 691309510008
pins: 1, 2, 3, 4, 5, 6, 7, 8

## 691309510012
designator J?  (value not drawn)
WR-TBL Series 3095 Reversed Gender Horizontal PCB Header, THT, pitch 5.08mm, 12p; Manufacturer: Wurth Elektronik; Modularity: No; Rated Current: 20A; Working Voltage: 300V (AC); Manufacturer Part Number: 691309510012; Product Series: WR-TBL; ComponentLink1Description: Website Link; ComponentLink1URL: https://www.we-online.com; ComponentLink2Description: Datasheet Link; ComponentLink2URL: https://www.we-online.com/components/products/datasheet/691309510012; Mount: Through Hole; Operating Temperature Min: -40degC; Operating Temperature Max: 105degC; Packaging: Box; Application: Pluggable; Number of Pins: 12; Number of Rows: 1; Orientation: Horizontal; Lead Pitch: 5.08mm
footprint 691309510012
pins: 1, 2, 3, 4, 5, 6, 7, 8, 9, 10, 11, 12

## 691310340002
designator J?  (value not drawn)
WR-TBL Series 3103 Horizontal PCB Header with Flanges, THT, pitch 3.81mm, 02p; Manufacturer: Wurth Elektronik; Modularity: No; Rated Current: 8A; Working Voltage: 300V (AC); Manufacturer Part Number: 691310340002; Product Series: WR-TBL; ComponentLink1Description: Website Link; ComponentLink1URL: https://www.we-online.com; ComponentLink2Description: Datasheet Link; ComponentLink2URL: https://www.we-online.com/components/products/datasheet/691310340002; Mount: Through Hole; Operating Temperature Min: -40degC; Operating Temperature Max: 115degC; Packaging: Box; Application: Pluggable; Number of Pins: 2; Number of Rows: 1; Orientation: Horizontal; Lead Pitch: 3.81mm
footprint 691310340002
pins: 1, 2

## 691310340003
designator J?  (value not drawn)
WR-TBL Series 3103 Horizontal PCB Header with Flanges, THT, pitch 3.81mm, 03p; Manufacturer: Wurth Elektronik; Modularity: No; Rated Current: 8A; Working Voltage: 300V (AC); Manufacturer Part Number: 691310340003; Product Series: WR-TBL; ComponentLink1Description: Website Link; ComponentLink1URL: https://www.we-online.com; ComponentLink2Description: Datasheet Link; ComponentLink2URL: https://www.we-online.com/components/products/datasheet/691310340003; Mount: Through Hole; Operating Temperature Min: -40degC; Operating Temperature Max: 115degC; Packaging: Box; Application: Pluggable; Number of Pins: 3; Number of Rows: 1; Orientation: Horizontal; Lead Pitch: 3.81mm
footprint 691310340003
pins: 1, 2, 3

## 691310340004
designator J?  (value not drawn)
WR-TBL Series 3103 Horizontal PCB Header with Flanges, THT, pitch 3.81mm, 04p; Manufacturer: Wurth Elektronik; Modularity: No; Rated Current: 8A; Working Voltage: 300V (AC); Manufacturer Part Number: 691310340004; Product Series: WR-TBL; ComponentLink1Description: Website Link; ComponentLink1URL: https://www.we-online.com; ComponentLink2Description: Datasheet Link; ComponentLink2URL: https://www.we-online.com/components/products/datasheet/691310340004; Mount: Through Hole; Operating Temperature Min: -40degC; Operating Temperature Max: 115degC; Packaging: Box; Application: Pluggable; Number of Pins: 4; Number of Rows: 1; Orientation: Horizontal; Lead Pitch: 3.81mm
footprint 691310340004
pins: 1, 2, 3, 4

## 691310340005
designator J?  (value not drawn)
WR-TBL Series 3103 Horizontal PCB Header with Flanges, THT, pitch 3.81mm, 05p; Manufacturer: Wurth Elektronik; Modularity: No; Rated Current: 8A; Working Voltage: 300V (AC); Manufacturer Part Number: 691310340005; Product Series: WR-TBL; ComponentLink1Description: Website Link; ComponentLink1URL: https://www.we-online.com; ComponentLink2Description: Datasheet Link; ComponentLink2URL: https://www.we-online.com/components/products/datasheet/691310340005; Mount: Through Hole; Operating Temperature Min: -40degC; Operating Temperature Max: 115degC; Packaging: Box; Application: Pluggable; Number of Pins: 5; Number of Rows: 1; Orientation: Horizontal; Lead Pitch: 3.81mm
footprint 691310340005
pins: 1, 2, 3, 4, 5

## 691310340006
designator J?  (value not drawn)
WR-TBL Series 3103 Horizontal PCB Header with Flanges, THT, pitch 3.81mm, 06p; Manufacturer: Wurth Elektronik; Modularity: No; Rated Current: 8A; Working Voltage: 300V (AC); Manufacturer Part Number: 691310340006; Product Series: WR-TBL; ComponentLink1Description: Website Link; ComponentLink1URL: https://www.we-online.com; ComponentLink2Description: Datasheet Link; ComponentLink2URL: https://www.we-online.com/components/products/datasheet/691310340006; Mount: Through Hole; Operating Temperature Min: -40degC; Operating Temperature Max: 115degC; Packaging: Box; Application: Pluggable; Number of Pins: 6; Number of Rows: 1; Orientation: Horizontal; Lead Pitch: 3.81mm
footprint 691310340006
pins: 1, 2, 3, 4, 5, 6

## 691310340007
designator J?  (value not drawn)
WR-TBL Series 3103 Horizontal PCB Header with Flanges, THT, pitch 3.81mm, 07p; Manufacturer: Wurth Elektronik; Modularity: No; Rated Current: 8A; Working Voltage: 300V (AC); Manufacturer Part Number: 691310340007; Product Series: WR-TBL; ComponentLink1Description: Website Link; ComponentLink1URL: https://www.we-online.com; ComponentLink2Description: Datasheet Link; ComponentLink2URL: https://www.we-online.com/components/products/datasheet/691310340007; Mount: Through Hole; Operating Temperature Min: -40degC; Operating Temperature Max: 115degC; Packaging: Box; Application: Pluggable; Number of Pins: 7; Number of Rows: 1; Orientation: Horizontal; Lead Pitch: 3.81mm
footprint 691310340007
pins: 1, 2, 3, 4, 5, 6, 7

## 691310340008
designator J?  (value not drawn)
WR-TBL Series 3103 Horizontal PCB Header with Flanges, THT, pitch 3.81mm, 08p; Manufacturer: Wurth Elektronik; Modularity: No; Rated Current: 8A; Working Voltage: 300V (AC); Manufacturer Part Number: 691310340008; Product Series: WR-TBL; ComponentLink1Description: Website Link; ComponentLink1URL: https://www.we-online.com; ComponentLink2Description: Datasheet Link; ComponentLink2URL: https://www.we-online.com/components/products/datasheet/691310340008; Mount: Through Hole; Operating Temperature Min: -40degC; Operating Temperature Max: 115degC; Packaging: Box; Application: Pluggable; Number of Pins: 8; Number of Rows: 1; Orientation: Horizontal; Lead Pitch: 3.81mm
footprint 691310340008
pins: 1, 2, 3, 4, 5, 6, 7, 8

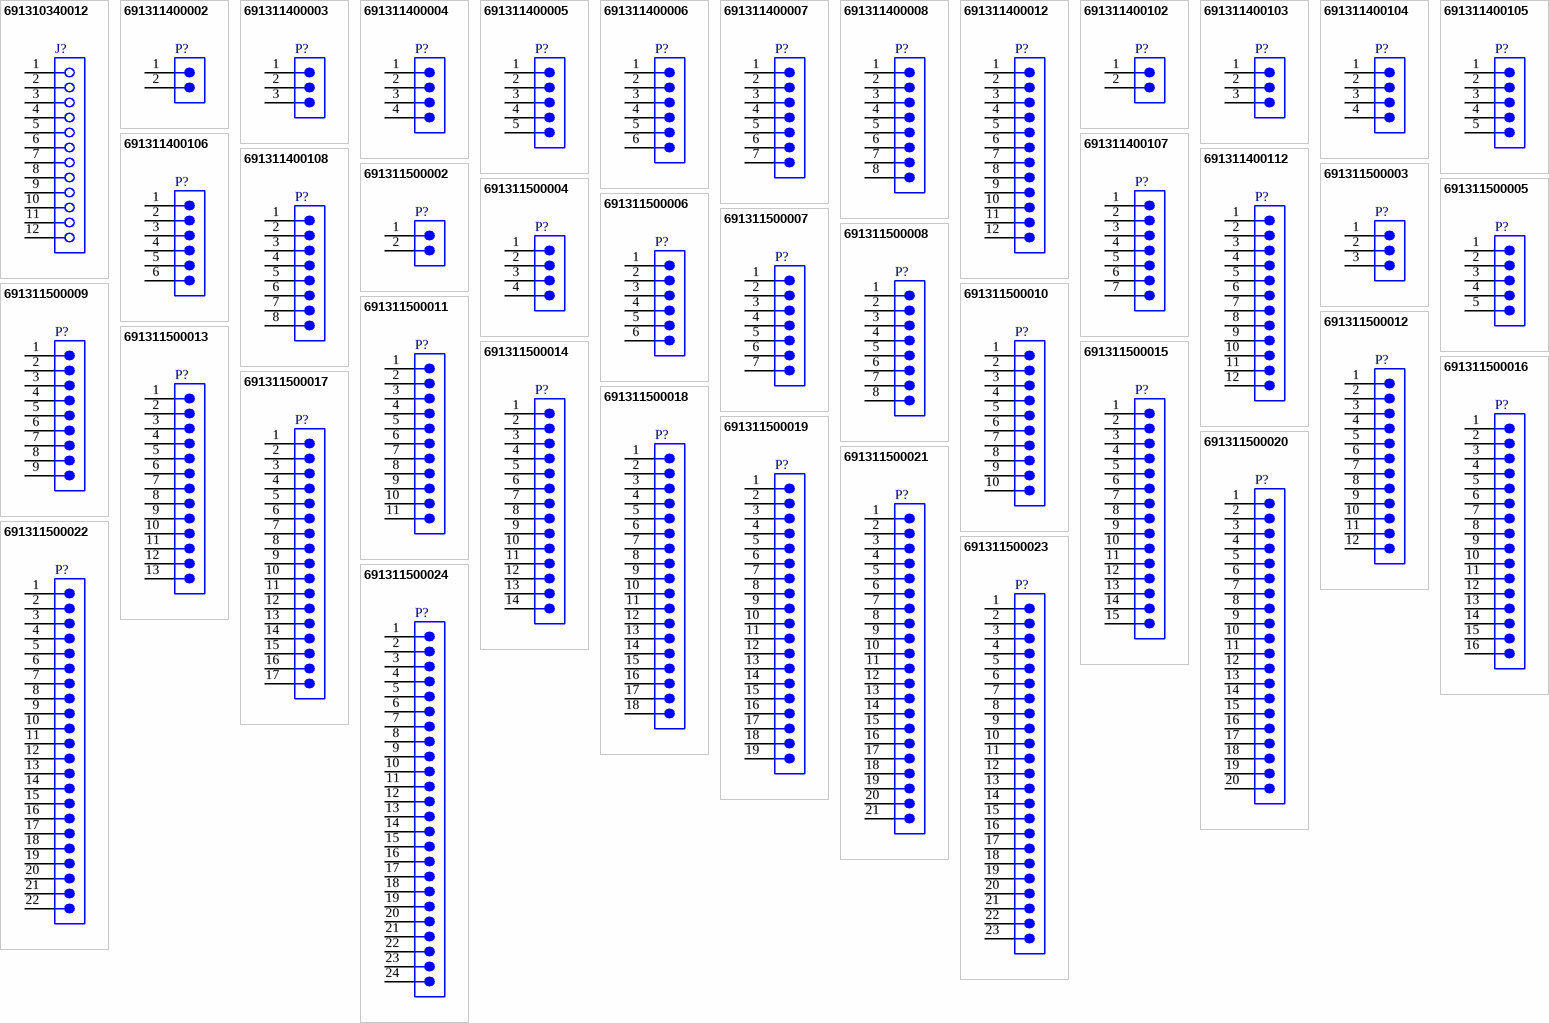
[diagram p3: symbols 691310340012 to 691311500024]

## 691310340012
designator J?  (value not drawn)
WR-TBL Series 3103 Horizontal PCB Header with Flanges, THT, pitch 3.81mm, 12p; Manufacturer: Wurth Elektronik; Modularity: No; Rated Current: 8A; Working Voltage: 300V (AC); Manufacturer Part Number: 691310340012; Product Series: WR-TBL; ComponentLink1Description: Website Link; ComponentLink1URL: https://www.we-online.com; ComponentLink2Description: Datasheet Link; ComponentLink2URL: https://www.we-online.com/components/products/datasheet/691310340012; Mount: Through Hole; Operating Temperature Min: -40degC; Operating Temperature Max: 115degC; Packaging: Box; Application: Pluggable; Number of Pins: 12; Number of Rows: 1; Orientation: Horizontal; Lead Pitch: 3.81mm
footprint 691310340012
pins: 1, 2, 3, 4, 5, 6, 7, 8, 9, 10, 11, 12

## 691311400002
designator P?  (value not drawn)
WR-TBL Series 3114 Open Vertical PCB Header, THT, pitch 7.62mm, 02p; Manufacturer: Wurth Elektronik; Modularity: No; Rated Current: 20A; Working Voltage: 300V (AC); Manufacturer Part Number: 691311400002; Product Series: WR-TBL; ComponentLink1Description: Website Link; ComponentLink1URL: https://www.we-online.com; ComponentLink2Description: Datasheet Link; ComponentLink2URL: https://www.we-online.com/components/products/datasheet/691311400002; Mount: Through Hole; Operating Temperature Min: -40degC; Operating Temperature Max: 105degC; Packaging: Box; Application: Pluggable; Number of Pins: 2; Number of Rows: 1; Orientation: Vertical; Lead Pitch: 7.62mm
footprint 691311400002
pins: 1, 2

## 691311400003
designator P?  (value not drawn)
WR-TBL Series 3114 Open Vertical PCB Header, THT, pitch 7.62mm, 03p; Manufacturer: Wurth Elektronik; Modularity: No; Rated Current: 20A; Working Voltage: 300V (AC); Manufacturer Part Number: 691311400003; Product Series: WR-TBL; ComponentLink1Description: Website Link; ComponentLink1URL: https://www.we-online.com; ComponentLink2Description: Datasheet Link; ComponentLink2URL: https://www.we-online.com/components/products/datasheet/691311400003; Mount: Through Hole; Operating Temperature Min: -40degC; Operating Temperature Max: 105degC; Packaging: Box; Application: Pluggable; Number of Pins: 3; Number of Rows: 1; Orientation: Vertical; Lead Pitch: 7.62mm
footprint 691311400003
pins: 1, 2, 3

## 691311400004
designator P?  (value not drawn)
WR-TBL Series 3114 Open Vertical PCB Header, THT, pitch 7.62mm, 04p; Manufacturer: Wurth Elektronik; Modularity: No; Rated Current: 20A; Working Voltage: 300V (AC); Manufacturer Part Number: 691311400004; Product Series: WR-TBL; ComponentLink1Description: Website Link; ComponentLink1URL: https://www.we-online.com; ComponentLink2Description: Datasheet Link; ComponentLink2URL: https://www.we-online.com/components/products/datasheet/691311400004; Mount: Through Hole; Operating Temperature Min: -40degC; Operating Temperature Max: 105degC; Packaging: Box; Application: Pluggable; Number of Pins: 4; Number of Rows: 1; Orientation: Vertical; Lead Pitch: 7.62mm
footprint 691311400004
pins: 1, 2, 3, 4

## 691311400005
designator P?  (value not drawn)
WR-TBL Series 3114 Open Vertical PCB Header, THT, pitch 7.62mm, 05p; Manufacturer: Wurth Elektronik; Modularity: No; Rated Current: 20A; Working Voltage: 300V (AC); Manufacturer Part Number: 691311400005; Product Series: WR-TBL; ComponentLink1Description: Website Link; ComponentLink1URL: https://www.we-online.com; ComponentLink2Description: Datasheet Link; ComponentLink2URL: https://www.we-online.com/components/products/datasheet/691311400005; Mount: Through Hole; Operating Temperature Min: -40degC; Operating Temperature Max: 105degC; Packaging: Box; Application: Pluggable; Number of Pins: 5; Number of Rows: 1; Orientation: Vertical; Lead Pitch: 7.62mm
footprint 691311400005
pins: 1, 2, 3, 4, 5

## 691311400006
designator P?  (value not drawn)
WR-TBL Series 3114 Open Vertical PCB Header, THT, pitch 7.62mm, 06p; Manufacturer: Wurth Elektronik; Modularity: No; Rated Current: 20A; Working Voltage: 300V (AC); Manufacturer Part Number: 691311400006; Product Series: WR-TBL; ComponentLink1Description: Website Link; ComponentLink1URL: https://www.we-online.com; ComponentLink2Description: Datasheet Link; ComponentLink2URL: https://www.we-online.com/components/products/datasheet/691311400006; Mount: Through Hole; Operating Temperature Min: -40degC; Operating Temperature Max: 105degC; Packaging: Box; Application: Pluggable; Number of Pins: 6; Number of Rows: 1; Orientation: Vertical; Lead Pitch: 7.62mm
footprint 691311400006
pins: 1, 2, 3, 4, 5, 6

## 691311400007
designator P?  (value not drawn)
WR-TBL Series 3114 Open Vertical PCB Header, THT, pitch 7.62mm, 07p; Manufacturer: Wurth Elektronik; Modularity: No; Rated Current: 20A; Working Voltage: 300V (AC); Manufacturer Part Number: 691311400007; Product Series: WR-TBL; ComponentLink1Description: Website Link; ComponentLink1URL: https://www.we-online.com; ComponentLink2Description: Datasheet Link; ComponentLink2URL: https://www.we-online.com/components/products/datasheet/691311400007; Mount: Through Hole; Operating Temperature Min: -40degC; Operating Temperature Max: 105degC; Packaging: Box; Application: Pluggable; Number of Pins: 7; Number of Rows: 1; Orientation: Vertical; Lead Pitch: 7.62mm
footprint 691311400007
pins: 1, 2, 3, 4, 5, 6, 7

## 691311400008
designator P?  (value not drawn)
WR-TBL Series 3114 Open Vertical PCB Header, THT, pitch 7.62mm, 08p; Manufacturer: Wurth Elektronik; Modularity: No; Rated Current: 20A; Working Voltage: 300V (AC); Manufacturer Part Number: 691311400008; Product Series: WR-TBL; ComponentLink1Description: Website Link; ComponentLink1URL: https://www.we-online.com; ComponentLink2Description: Datasheet Link; ComponentLink2URL: https://www.we-online.com/components/products/datasheet/691311400008; Mount: Through Hole; Operating Temperature Min: -40degC; Operating Temperature Max: 105degC; Packaging: Box; Application: Pluggable; Number of Pins: 8; Number of Rows: 1; Orientation: Vertical; Lead Pitch: 7.62mm
footprint 691311400008
pins: 1, 2, 3, 4, 5, 6, 7, 8